# Altium schematic symbol library C2012X5R1E475K125AB.SchLib: 1 symbol
Pins are listed as number, name and electrical type; pins without a type are passive.

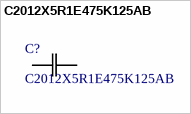
[diagram p0: symbol C2012X5R1E475K125AB]

## C2012X5R1E475K125AB
designator C?
CAP CER 4.7UF 25V X5R 0805; Manufacturer_Name: TDK; Copyright: Copyright (C) 2026 Ultra Librarian. All rights reserved.; Manufacturer_Part_Number: C2012X5R1E475K125AB
footprint CAP_2012_TDK
pins: 1, 2